# Altium footprint library Amin-Library.PcbLib: 601 footprints (part 8 of 38)
Each footprint in its own frame and in the unit in brackets; x right, y up, seen from the top. Pads: shape width x height; smd on the part's side, far side on the other; paste and mask are expansions set on the pad; w line width, h text height; cw(c..) or ccw(c..) is an arc to the next point about the centre after c.
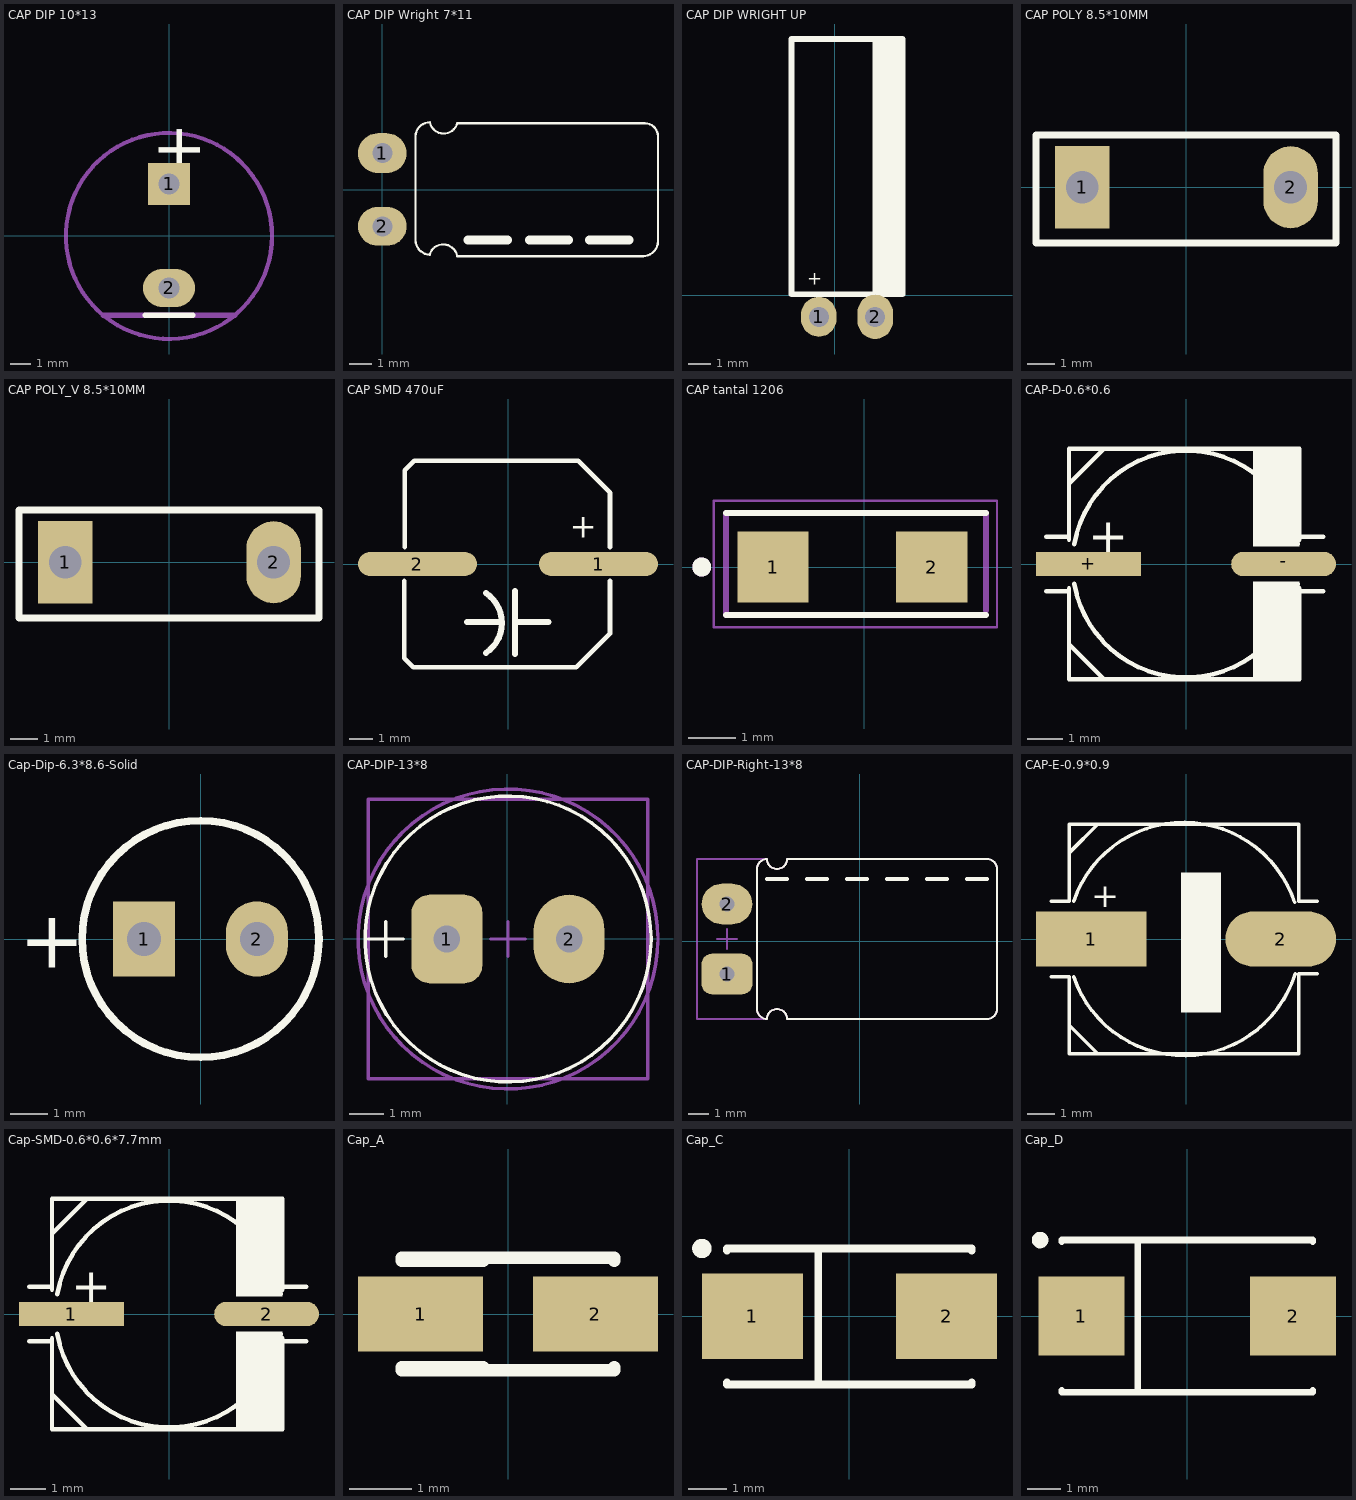
[diagram p7: the footprints below, top view; thin cyan lines are the x and y axes]

## CAP DIP 10*13 [mm] "CAP 10*13"
pads (2):
  rect 2.032x2.032 hole 1: 1(0,2.5)
  oval 2.5x1.829 hole 1: 2(0,-2.5)
Top Overlay:
  lines w0.254: -1.143,-3.81 1.143,-3.81
  text "+" at -1.27,5.461 h4
Top Courtyard:
  circle w0.2: c0,0 r4.95
  circle w0.2: c0,0 r4.95
  lines w0.254: -3.175,-3.81 3.175,-3.81
3D body "User Library-Cap electrolitic radial 10x13.STEP": height 13.3, standoff -1.2, extent -4.998,-4.998 4.998,4.998

## CAP DIP Wright 7*11 [mm]
pads (2):
  oval 2.2x1.8 hole 0.9: 1(0,1.651)
  oval 2.2x1.75 hole 0.9: 2(0,-1.651)
Top Overlay:
  lines w0.1: 1.496,-2.296 1.496,2.424 ; 1.497,-2.281 ccw(c2.145,-2.281) 2.132,-2.928 ; 1.498,2.41 cw(c2.145,2.397) 2.145,3.045 ccw(c2.768,3.169) 3.38,3 ; 2.134,-2.931 cw(c2.746,-3.101) 3.369,-2.976 ; 3.377,-3 11.784,-3 ; 3.38,3 11.847,3 ; 11.757,-2.997 ccw(c11.757,-2.314) 12.44,-2.328 ; 11.859,3 cw(c11.847,2.408) 12.439,2.408 ; 12.44,-2.296 12.44,2.416
  lines w0.4: 3.872,-2.264 5.648,-2.264 ; 6.632,-2.264 8.408,-2.264 ; 9.352,-2.264 11.128,-2.264
3D body "C-HOR_MIR__D-6__L-11__P2,5__STAND-2__TMP-105__C-100u__U-16.stp": height 6.5, standoff -5.1, extent -0.206,-3 12.144,2.999

## CAP DIP WRIGHT UP [mm]
height 1.91
pads (2):
  oval 1.6x1.8 hole 0.9: 1(-0.72,-0.975)
  oval 1.6x2 hole 0.9: 2(1.82,-0.975)
Top Overlay:
  rectangle: 1.82,0.041 2.95,11.466
  lines w0.254: -0.72,-0.975 -0.72,0.041 ; 1.82,-0.975 1.82,0.041 1.82,11.516 ; 3.05,11.516 3.05,0.041 -1.95,0.041 -1.95,11.541 3.05,11.541
  text "+" at -1.25,0.275 h1
3D body "C-HOR_MIR__D-6,3__L-11__P2,5__STAND-7,5__TMP-105__C-100u__U-16.stp": height 13.15, standoff -4.25, extent -2.54,-1.222 3.758,11.128

## CAP POLY 8.5*10MM [mm]
pads (2):
  rect 2x3 hole 1.2: 1(-3.81,0)
  oval 2x3 hole 1.2: 2(3.81,0)
Top Overlay:
  lines w0.254: -5.5,1.905 -5.5,-2.032 5.47,-2.032 5.47,1.905 ; -5.461,1.905 5.461,1.905
3D body "User Library-CAPRR750W60L1030T570H1250_WIMA_2F.STEP": height 3.15, standoff -2.55, extent -5.22,0.04 5.08,15.04

## CAP POLY_V 8.5*10MM [mm]
pads (2):
  rect 2x3 hole 1.2: 1(-3.81,0)
  oval 2x3 hole 1.2: 2(3.81,0)
Top Overlay:
  lines w0.254: -5.5,1.905 -5.5,-2.032 5.47,-2.032 5.47,1.905 ; -5.461,1.905 5.461,1.905
3D body "User Library-CAPRR750W60L1030T570H1250_WIMA_2F.STEP": height 12.51, standoff -2.49, extent -5.15,-2.85 5.15,2.85

## CAP SMD 470uF [mm] "SMD CAP 470uF"
height 2.54
pads (2):
  oval 5x1 smd: 1(3.81,0) 2(-3.81,0)
Top Overlay:
  lines w0.2: -4.369,-0.711 -4.369,-3.962 -3.988,-4.343 2.87,-4.343 4.293,-2.921 4.293,-0.711 ; -4.343,0.711 -4.343,3.937 -3.937,4.343 2.946,4.343 4.293,2.997 4.293,0.711
  lines w0.254: -1.715,-2.447 -0.365,-2.447 ; -0.935,-3.737 ccw(c-1.753,-2.48) -0.927,-1.227 ; 0.285,-3.777 0.285,-1.137 ; 0.365,-2.447 1.705,-2.447
  text "+" at 2.6,1.1 h1
3D body "User Library-SMD Polymer Aluminum Electrolytic Capacitors E12 470uF 6,3V.step": height 12, standoff 0.05, extent -4.53,-4.15 4.47,4.15

## CAP tantal 1206 [mm]
pads (2):
  rect 1.5x1.5 smd: 1(-1.927,0) 2(1.419,0)
Top Overlay:
  circle w0.2: c-3.429,0 r0.1
  lines w0.127: -2.921,-1.016 2.558,-1.016 ; -2.921,1.143 2.558,1.143
Mechanical 4:
  circle w0.2: c-3.429,0 r0.1
  circle w0.2: c-3.429,0 r0.1
  lines w0.127: 2.155,1.143 -2.921,1.143 ; 2.558,-0.915 2.558,1.143 -2.921,1.143 ; -2.921,-1.016 -2.921,1.143 ; -2.921,-1.016 2.54,-1.016 2.413,-1.016 -2.921,-1.016 ; -2.921,-1.016 -2.921,1.143
Mechanical 16:
  lines w0.05: -3.175,-1.27 -3.175,1.397 2.794,1.397 2.794,-1.27 -3.175,-1.27
3D body "User Library-AVX_ACASE.step": height 1.71, standoff 0, extent -1.954,-0.84 1.446,0.84

## CAP-D-0.6*0.6 [mm]
pads (2):
  rect 3x0.7 smd: +(-2.794,0)
  oval 3x0.7 smd: -(2.794,0)
Top Overlay:
  rectangle: 1.924,-3.3 3.249,-0.494
  rectangle: 1.925,0.508 3.25,3.3
  lines w0.127: -4,-0.775 -3.35,-0.775 ; -4,0.775 -3.35,0.775 ; -3.35,-2.3 -2.35,-3.3 ; -3.35,-0.7 -3.35,-3.3 3.25,-3.3 3.25,-0.7 ; -3.35,0.7 -3.35,3.3 3.25,3.3 3.25,0.7 ; -3.35,2.3 -2.35,3.3 ; -3.201,-0.565 ccw(c0,0) 3.2,-0.565 ; -3.201,0.564 cw(c0,0) 3.201,0.564 ; 3.25,-0.775 3.925,-0.775 ; 3.25,0.775 3.925,0.775
  text "+" at -2.8,0.325 h1
3D body "User Library-ALU-D.STEP": height 5.4, standoff 0, extent -3.5,-3.3 3.5,3.3

## Cap-Dip-6.3*8.6-Solid [mm]
pads (2):
  rect 1.65x2 hole 0.9: 1(-1.5,0)
  oval 1.65x2 hole 0.9: 2(1.5,0)
Top Overlay:
  circle w0.2: c0,0 r3.15
  text "+" at -4.826,-0.762 h1.52
3D body "C-VERT__D-6,3__L-9__P-2,5__TMP-105__C-1u__U-16.stp": height 9, standoff -3.5, extent -3.151,-3.151 3.15,3.149

## CAP-DIP-13*8 [mil]
pads (2):
  rrect50% 80x100 hole 30: 1(-67.98,0)
  oval 80x100 hole 30: 2(69.82,0)
Top Overlay:
  circle w3.94: c0.92,0 r161.42
  lines w3.94: -156.56,0 -117.19,0 ; -136.88,-19.69 -136.88,19.68
Mechanical 13:
  lines w3.94: -156.56,-157.48 158.4,-157.48 158.4,157.48 -156.56,157.48 -156.56,-157.48
Mechanical 15:
  circle w3.94: c0.92,0 r169.29
  lines w3.94: -18.77,0 20.6,0 ; 0.92,-19.69 0.92,19.68
3D body "8x11.5x3.5x0.5.stp": height 770.08, standoff -478.74, extent -156.32,-157.27 158,157.48

## CAP-DIP-Right-13*8 [mil]
pads (2):
  rrect50% 100x80 hole 30: 1(-260.89,-64.11)
  oval 100x80 hole 30: 2(-260.89,73.68)
Top Overlay:
  lines w3.94: -201.83,-133.01 ccw(c-182.15,-133.01) -182.15,-152.7 cw(c-162.46,-152.7) -142.78,-152.7 250.93,-152.7 ccw(c250.93,-133.01) 270.61,-133.01 270.61,142.58 ccw(c250.93,142.58) 250.93,162.26 -142.78,162.26 cw(c-162.46,162.26) -182.15,162.26 ccw(c-182.15,142.58) -201.83,142.58 -201.83,-133.01
  lines w7.87: -182.15,122.89 -142.78,122.89 ; -103.41,122.89 -64.04,122.89 ; -24.67,122.89 14.7,122.89 ; 54.07,122.89 93.44,122.89 ; 132.81,122.89 172.19,122.89 ; 211.56,122.89 250.93,122.89
Mechanical 15:
  lines w3.94: -280.57,4.78 -241.2,4.78 ; -260.89,-14.9 -260.89,24.47 ; -319.94,-152.7 -319.94,162.26 -182.15,162.26 ; -319.94,-152.7 -319.94,-152.7 ; -319.94,-152.7 -182.15,-152.7 ; -182.15,-152.7 cw(c-182.15,-133.01) -201.83,-133.01 -201.83,142.58 cw(c-182.15,142.58) -182.15,162.26 ; -182.15,-152.7 cw(c-162.46,-152.7) -142.78,-152.7 250.93,-152.7 ccw(c250.93,-133.01) 270.61,-133.01 270.61,142.58 ccw(c250.93,142.58) 250.93,162.26 -142.78,162.26 cw(c-162.46,162.26) -182.15,162.26
3D body "C-HOR__D-8__L-11,5__P3,5__STAND-0__TMP-105__C-100u__U-16.stp": height 315, standoff -141.73, extent -273.14,-152.48 232.76,162.52

## CAP-E-0.9*0.9 [mm]
pads (2):
  rect 4x2 smd: 1(-3.429,0)
  oval 4x2 smd: 2(3.429,0)
Top Overlay:
  rectangle: -0.18,-2.662 1.27,2.413
  lines w0.127: -4.875,-1.369 -4.225,-1.369 -4.225,-3.125 -3.2,-4.15 ; -4.876,1.373 -4.225,1.373 ; -4.225,-1.8 -4.225,-4.15 4.075,-4.15 4.075,-1.8 ; -4.225,2.65 -4.225,1.373 ; -4.2,3.15 -3.2,4.15 ; -4.067,-1.369 ccw(c-0.076,0) 3.955,-1.25 ; -4.067,1.373 cw(c-0.077,0.001) 3.93,1.325 ; 4.75,-1.25 4.075,-1.25 4.075,-1.8 ; 4.75,1.373 4.075,1.373 4.075,4.15 -4.225,4.15 -4.225,1.373 ; -4.225,1.373 -4.225,3.3 ; -4.225,3.3 -4.225,3.3 ; 4.075,-1.8 4.075,-1.8 ; -4.225,-3.3 -4.225,-3.3
  text "+" at -3.429,1.143 h0.89
3D body "User Library-ALU-E.STEP": height 6.2, standoff 0, extent -4.627,-4.15 4.373,4.15

## Cap-SMD-0.6*0.6*7.7mm [mm]
pads (2):
  rect 3x0.7 smd: 1(-2.794,0)
  oval 3x0.7 smd: 2(2.794,0)
Top Overlay:
  rectangle: 1.924,-3.3 3.249,-0.494
  rectangle: 1.925,0.508 3.25,3.3
  lines w0.127: -4,-0.775 -3.35,-0.775 ; -4,0.775 -3.35,0.775 ; -3.35,-2.3 -2.35,-3.3 ; -3.35,-0.7 -3.35,-3.3 3.25,-3.3 3.25,-0.7 ; -3.35,0.7 -3.35,3.3 3.25,3.3 3.25,0.7 ; -3.35,2.3 -2.35,3.3 ; -3.201,-0.565 ccw(c0,0) 3.2,-0.565 ; -3.201,0.564 cw(c0,0) 3.201,0.564 ; 3.25,-0.775 3.925,-0.775 ; 3.25,0.775 3.925,0.775
  text "+" at -2.8,0.325 h1
3D body "Modified-ALU-D.stp": height 7.7, standoff 0, extent -3.5,-3.3 3.5,3.3

## Cap_A [mm] "Capacitor, SM Tantalum; Body 3.2 x 1.6 mm (LxW typ)"
height 1.8
pads (2):
  rect 2x1.2 smd: 1(-1.4,0) 2(1.4,0)
Top Overlay:
  lines w0.2: -1.7,-0.9 1.7,-0.9 1.7,-0.85 ; -1.7,-0.85 -0.4,-0.85 ; -1.7,0.85 -0.4,0.85 ; -1.7,0.9 1.7,0.9 1.7,0.85
3D body "User Library-CaseA_3216-18.SLDPRT": height 1.6, standoff 0, extent -1.6,-0.8 1.6,0.8

## Cap_C [mm] "Capacitor, SM Tantalum; Body 6.0 x 3.2 mm (LxW typ)"
height 2.8
pads (2):
  rect 2.6x2.2 smd: 1(-2.5,0) 2(2.5,0)
Top Overlay:
  circle w0.25: c-3.8,1.75 r0.125
  lines w0.2: -3.15,-1.7 -3.15,-1.75 3.15,-1.75 3.15,-1.7 ; -3.15,1.7 -3.15,1.75 3.15,1.75 3.15,1.7 ; -0.8,-1.75 -0.8,1.75
3D body "User Library-CaseC_6032-28.SLDPRT": height 2.5, standoff 0, extent -3,-1.6 3,1.6

## Cap_D [mm] "Capacitor, SM Tantalum; Body 7.3 x 4.3 mm (LxW typ)"
height 3.1
pads (2):
  rect 2.6x2.4 smd: 1(-3.2,0) 2(3.2,0)
Top Overlay:
  circle w0.25: c-4.45,2.3 r0.125
  lines w0.2: -3.8,-2.25 -3.8,-2.3 3.8,-2.3 3.8,-2.25 ; -3.8,2.25 -3.8,2.3 3.8,2.3 3.8,2.25 ; -1.5,-2.3 -1.5,2.3
3D body "User Library-CaseD_7343-31.SLDPRT": height 2.8, standoff 0, extent -3.65,-2.15 3.65,2.15